# Altium footprint library CM5_Projeto_R6.PcbLib: 38 footprints (part 3 of 3)
Each footprint in its own frame and in the unit in brackets; x right, y up, seen from the top. Pads: shape width x height; smd on the part's side, far side on the other; paste and mask are expansions set on the pad; w line width, h text height; cw(c..) or ccw(c..) is an arc to the next point about the centre after c.
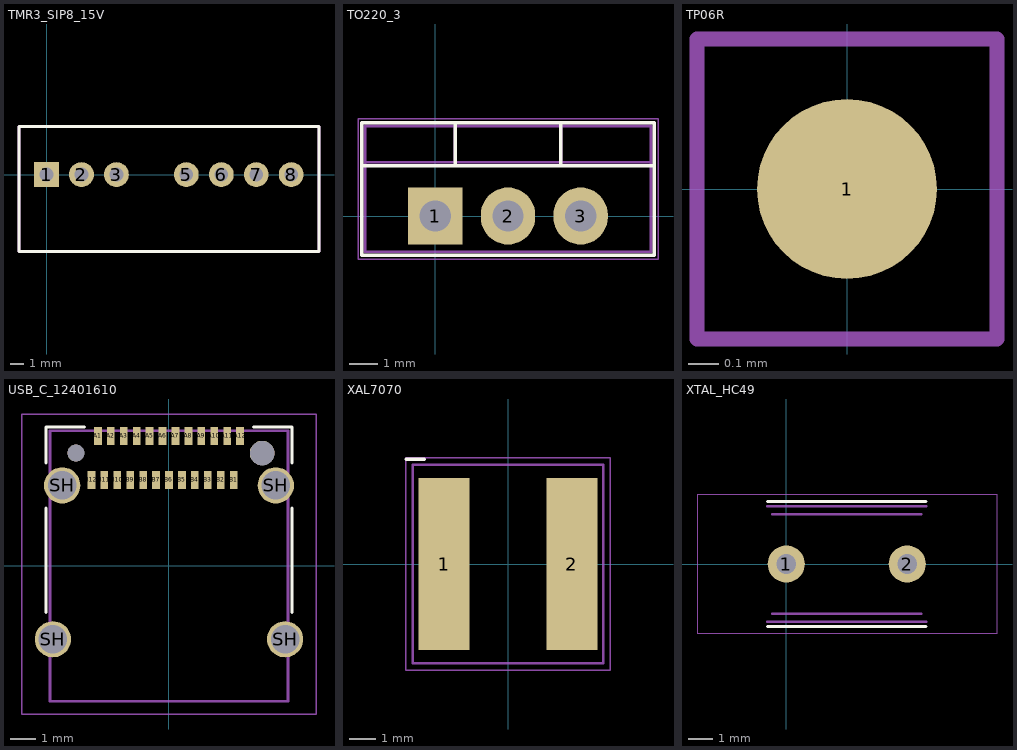
[diagram p2: the footprints below, top view; thin cyan lines are the x and y axes]

## TMR3_SIP8_15V [mm] "TMR 3-1213 single output; datasheet bottom view mirrored to top view. 7 pins, position 4 absent."
height 11.2
pads (7):
  rect 1.8x1.8 hole 1 mask+0.1: 1(0,0)
  round 1.8 hole 1 mask+0.1: 2(2.54,0) 3(5.08,0) 5(10.16,0) 6(12.7,0) 7(15.24,0) 8(17.78,0)
Top Overlay:
  lines w0.2: -2,-5.6 19.8,-5.6 19.8,3.5 -2,3.5 -2,-5.6
Bottom Assembly:
  lines w0.2: -2,-5.6 19.8,-5.6 19.8,3.5 -2,3.5 -2,-5.6
3D body "TMR3_SIP8_envelope.step": height 11.2, standoff 0, extent -2,-5.6 19.8,3.5

## TO220_3 [mm] "CM5 R3; fonte: CM5_Photonic.PcbLib; serigrafia revisada a 10 mil"
pads (3):
  rect 1.905x2 hole 1.1 paste-2 mask+0.05: 1(0,0)
  oval 1.905x2 hole 1.1 paste-2 mask+0.05: 2(2.54,0) 3(5.08,0)
Top Overlay:
  lines w0.12: -2.58,1.76 7.66,1.76 ; 0.69,1.76 0.69,3.27 ; 4.391,1.76 4.391,3.27 ; -2.58,-1.371 -2.58,3.27 7.66,3.27 7.66,-1.371 -2.58,-1.371
Bottom Assembly:
  lines w0.1: -2.46,1.88 7.54,1.88 ; 0.69,1.88 0.69,3.15 ; 4.39,1.88 4.39,3.15 ; -2.46,-1.25 -2.46,3.15 7.54,3.15 7.54,-1.25 -2.46,-1.25
Bottom Component Center:
  lines w0.05: -2.71,-1.51 -2.71,3.4 7.79,3.4 7.79,-1.51 -2.71,-1.51
3D body "TO220_3.step": height 18.77, standoff 0, extent -2.585,-1.295 7.665,3.16

## TP06R [mm] "CM5 R3; fonte: PCB-PCEIOT.PcbLib; serigrafia revisada a 10 mil"
pads (1):
  round 0.6 smd paste-1 mask+0.05: 1(0,0)
Bottom Component Center:
  lines w0.05: -0.5,-0.5 0.5,-0.5 0.5,0.5 -0.5,0.5 -0.5,-0.5

## USB_C_12401610 [mm] "CM5 R3; fonte: CM5_Photonic.PcbLib; serigrafia revisada a 10 mil"
pads (30):
  rect 0.3x0.7 smd paste+0 mask+0.04: A1(-2.75,5.02) A2(-2.25,5.02) A3(-1.75,5.02) A4(-1.25,5.02) A5(-0.75,5.02) A6(-0.25,5.02) A7(0.25,5.02) A8(0.75,5.02) A9(1.25,5.02) A10(1.75,5.02) A11(2.25,5.02) A12(2.75,5.02) B1(2.5,3.32) B2(2,3.32) B3(1.5,3.32) B4(1,3.32) B5(0.5,3.32) B6(0,3.32) B7(-0.5,3.32) B8(-1,3.32) B9(-1.5,3.32) B10(-2,3.32) B11(-2.5,3.32) B12(-3,3.32)
  round 1.4 hole 1.1 paste-1.4 mask+0.04: SH(-4.49,-2.84) SH(-4.13,3.11) SH(4.13,3.11) SH(4.49,-2.84)
  round 0.65 hole 0.65 unplated paste-0.65 mask+0.04: ""(-3.6,4.36)
  round 0.95 hole 0.95 unplated paste-0.95 mask+0.04: ""(3.6,4.36)
Top Overlay:
  lines w0.12: -4.75,-1.802 -4.75,2.238 ; -4.75,3.982 -4.75,5.37 -3.27,5.37 ; 3.27,5.37 4.75,5.37 4.75,3.982 ; 4.75,-1.802 4.75,2.238
Bottom Assembly:
  lines w0.1: -4.6,-5.23 -4.6,5.22 4.6,5.22 4.6,-5.23 -4.6,-5.23
Bottom Component Center:
  lines w0.05: -5.69,-5.73 -5.69,5.87 5.69,5.87 5.69,-5.73 -5.69,-5.73
3D body "USB_C_12401610.step": height 3.3, standoff 0, extent -4.6,-5.2 4.6,5.2

## XAL7070 [mm] "CM5 R3; fonte: CM5_Photonic.PcbLib; serigrafia revisada a 10 mil"
pads (2):
  rect 1.92x6.5 smd paste+0 mask+0.05: 1(-2.41,0) 2(2.41,0)
Top Overlay:
  lines w0.12: -3.85,3.95 -3.15,3.95
Bottom Assembly:
  lines w0.1: -3.6,-3.75 -3.6,3.75 3.6,3.75 3.6,-3.75 -3.6,-3.75
Bottom Component Center:
  lines w0.05: -3.85,-4 -3.85,4 3.85,4 3.85,-4 -3.85,-4
3D body "XAL7070.step": height 4.6, standoff 0, extent -3.6,-3.75 3.6,3.75

## XTAL_HC49 [mm] "CM5 R3; fonte: CM5_Photonic.PcbLib; serigrafia revisada a 10 mil"
pads (2):
  round 1.5 hole 0.8 paste-1.5 mask+0.05: 1(0,0) 2(4.88,0)
Top Overlay:
  lines w0.12: -0.76,-2.525 5.64,-2.525 ; -0.76,2.525 5.64,2.525
Bottom Assembly:
  lines w0.1: -0.76,-2.325 5.64,-2.325 ; -0.76,2.325 5.64,2.325 ; -0.56,-2 5.44,-2 ; -0.56,2 5.44,2
Bottom Component Center:
  lines w0.05: -3.6,-2.8 -3.6,2.8 8.5,2.8 8.5,-2.8 -3.6,-2.8
3D body "XTAL_HC49.step": height 4.1, standoff 0, extent -3.085,-2.325 7.965,2.325